# Altium footprint library Speaker.PcbLib: 4 footprints
Each footprint in its own frame and in the unit in brackets; x right, y up, seen from the top. Pads: shape width x height; smd on the part's side, far side on the other; paste and mask are expansions set on the pad; w line width, h text height; cw(c..) or ccw(c..) is an arc to the next point about the centre after c.
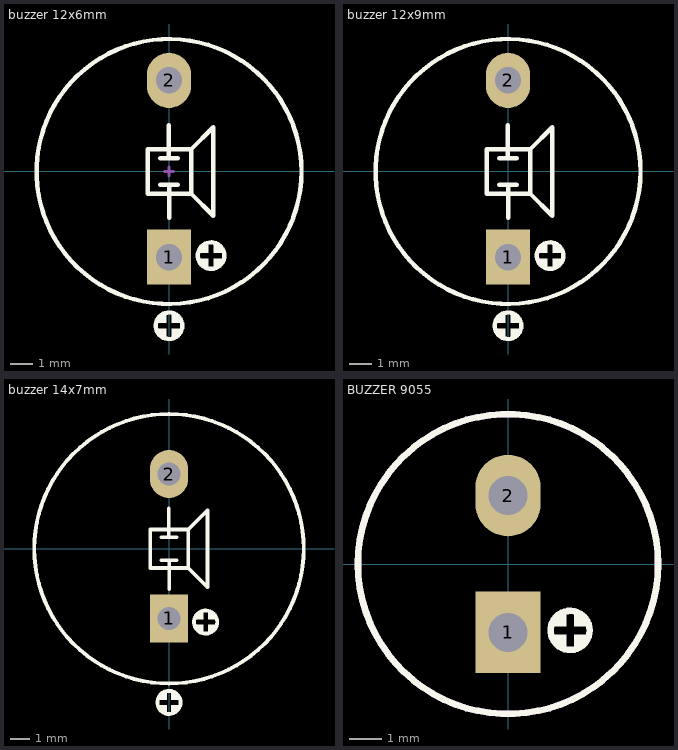
[diagram p0: the footprints below, top view; thin cyan lines are the x and y axes]

## buzzer 12x6mm [mm]
pads (2):
  rect 2x2.5 hole 1.2 mask+0: 1(0,-3.873)
  oval 2x2.5 hole 1.2 mask+0: 2(0,4.127)
Top Overlay:
  circle w0.2: c0,-6.985 r0.6
  circle w0.2: c1.905,-3.81 r0.6
  circle w0.2: c0,0 r6
  region: 0.5,-6.485 0.112,-6.485 0.112,-6.858 0.5,-6.858
  region: 0.5,-7.112 0.112,-7.112 0.112,-7.485 0.5,-7.485
  rectangle: -0.5,-7.485 -0.112,-7.112
  rectangle: -0.5,-6.858 -0.112,-6.485
  region: 2.405,-3.31 2.017,-3.31 2.017,-3.683 2.405,-3.683
  region: 2.405,-3.937 2.017,-3.937 2.017,-4.31 2.405,-4.31
  rectangle: 1.405,-4.31 1.793,-3.937
  rectangle: 1.405,-3.683 1.793,-3.31
  lines w0.2: -0.4,-0.6 0.4,-0.6 ; -0.4,0.6 0.4,0.6 ; -0.014,0.6 -0.014,2.1 ; 0.014,-2.1 0.014,-0.6 ; 1,-1 2,-2.002 2,2.002 1,1 ; 1,-1 -0.971,-1 -0.971,1 1,1 ; 1,-1 1,1
Top Designator:
  text ".Designator" at -3.71,-1.136 h1.52
Mechanical 15:
  lines w0.15: -0.2,0 0.2,0 ; 0,-0.2 0,0.2
3D body "User Library-HMB 1206-12 (1).step": height 7.01, standoff -5.99, extent -5.988,-6.005 5.988,6.005

## buzzer 12x9mm [mm]
pads (2):
  rect 2x2.5 hole 1.2 mask+0: 1(0,-3.873)
  oval 2x2.5 hole 1.2 mask+0: 2(0,4.127)
Top Overlay:
  circle w0.2: c0,0 r6
  circle w0.2: c1.905,-3.81 r0.6
  circle w0.2: c0,-6.985 r0.6
  rectangle: 1.405,-3.683 1.793,-3.31
  rectangle: 1.405,-4.31 1.793,-3.937
  region: 2.405,-3.937 2.017,-3.937 2.017,-4.31 2.405,-4.31
  region: 2.405,-3.31 2.017,-3.31 2.017,-3.683 2.405,-3.683
  rectangle: -0.5,-6.858 -0.112,-6.485
  rectangle: -0.5,-7.485 -0.112,-7.112
  region: 0.5,-7.112 0.112,-7.112 0.112,-7.485 0.5,-7.485
  region: 0.5,-6.485 0.112,-6.485 0.112,-6.858 0.5,-6.858
  lines w0.2: -0.4,-0.6 0.4,-0.6 ; -0.4,0.6 0.4,0.6 ; -0.014,0.6 -0.014,2.1 ; 0.014,-2.1 0.014,-0.6 ; 1,-1 1,1 ; 1,-1 -0.971,-1 -0.971,1 1,1 ; 1,-1 2,-2.002 2,2.002 1,1
Top Designator:
  text ".Designator" at -3.71,-1.136 h1.52
3D body "buzzer 12mm_fix.STEP": height 9, standoff -2.5, extent -5.939,-5.924 6.041,6.076

## buzzer 14x7mm [mm]
pads (2):
  rect 2x2.5 hole 1.2 mask+0: 1(0,-3.623)
  oval 2x2.5 hole 1.2 mask+0: 2(0,3.877)
Top Overlay:
  circle w0.2: c0,-7.985 r0.6
  circle w0.2: c1.905,-3.81 r0.6
  circle w0.2: c0,0 r7
  region: 0.5,-7.485 0.112,-7.485 0.112,-7.858 0.5,-7.858
  region: 0.5,-8.112 0.112,-8.112 0.112,-8.485 0.5,-8.485
  rectangle: -0.5,-8.485 -0.112,-8.112
  rectangle: -0.5,-7.858 -0.112,-7.485
  region: 2.405,-3.31 2.017,-3.31 2.017,-3.683 2.405,-3.683
  region: 2.405,-3.937 2.017,-3.937 2.017,-4.31 2.405,-4.31
  rectangle: 1.405,-4.31 1.793,-3.937
  rectangle: 1.405,-3.683 1.793,-3.31
  lines w0.2: -0.4,-0.6 0.4,-0.6 ; -0.4,0.6 0.4,0.6 ; -0.014,0.6 -0.014,2.1 ; 0.014,-2.1 0.014,-0.6 ; 1,-1 2,-2.002 2,2.002 1,1 ; 1,-1 -0.971,-1 -0.971,1 1,1 ; 1,-1 1,1
Top Designator:
  text ".Designator" at -3.71,-1.136 h1.52
3D body "1407.STEP": height 7, standoff -3, extent -7,-6.988 7,6.988

## BUZZER 9055 [mm] "9x5.5mm"
pads (2):
  rect 2x2.5 hole 1.2 mask+0: 1(0,-2.1)
  oval 2x2.5 hole 1.2 mask+0: 2(0,2.1)
Top Overlay:
  circle w0.2: c1.905,-2.037 r0.6
  circle w0.2: c0,0 r4.6
  rectangle: 1.405,-1.91 1.793,-1.537
  rectangle: 1.405,-2.537 1.793,-2.164
  region: 2.405,-2.164 2.017,-2.164 2.017,-2.537 2.405,-2.537
  region: 2.405,-1.537 2.017,-1.537 2.017,-1.91 2.405,-1.91
Top Designator:
  text ".Designator" at -3.71,-0.344 h1.52
Mechanical 15:
  circle w0.2: c0,0 r4.6
3D body: height 5.6, standoff 0.1, extent -4.6,-4.6 4.6,4.6
3D body: height 0.1, standoff -4.5, extent -0.3,-2.4 0.3,-1.8
3D body: height 0.1, standoff -4.5, extent -0.3,1.8 0.3,2.4